# Altium footprint library Dlib.PcbLib: 70 footprints (part 2 of 5)
Each footprint in its own frame and in the unit in brackets; x right, y up, seen from the top. Pads: shape width x height; smd on the part's side, far side on the other; paste and mask are expansions set on the pad; w line width, h text height; cw(c..) or ccw(c..) is an arc to the next point about the centre after c.
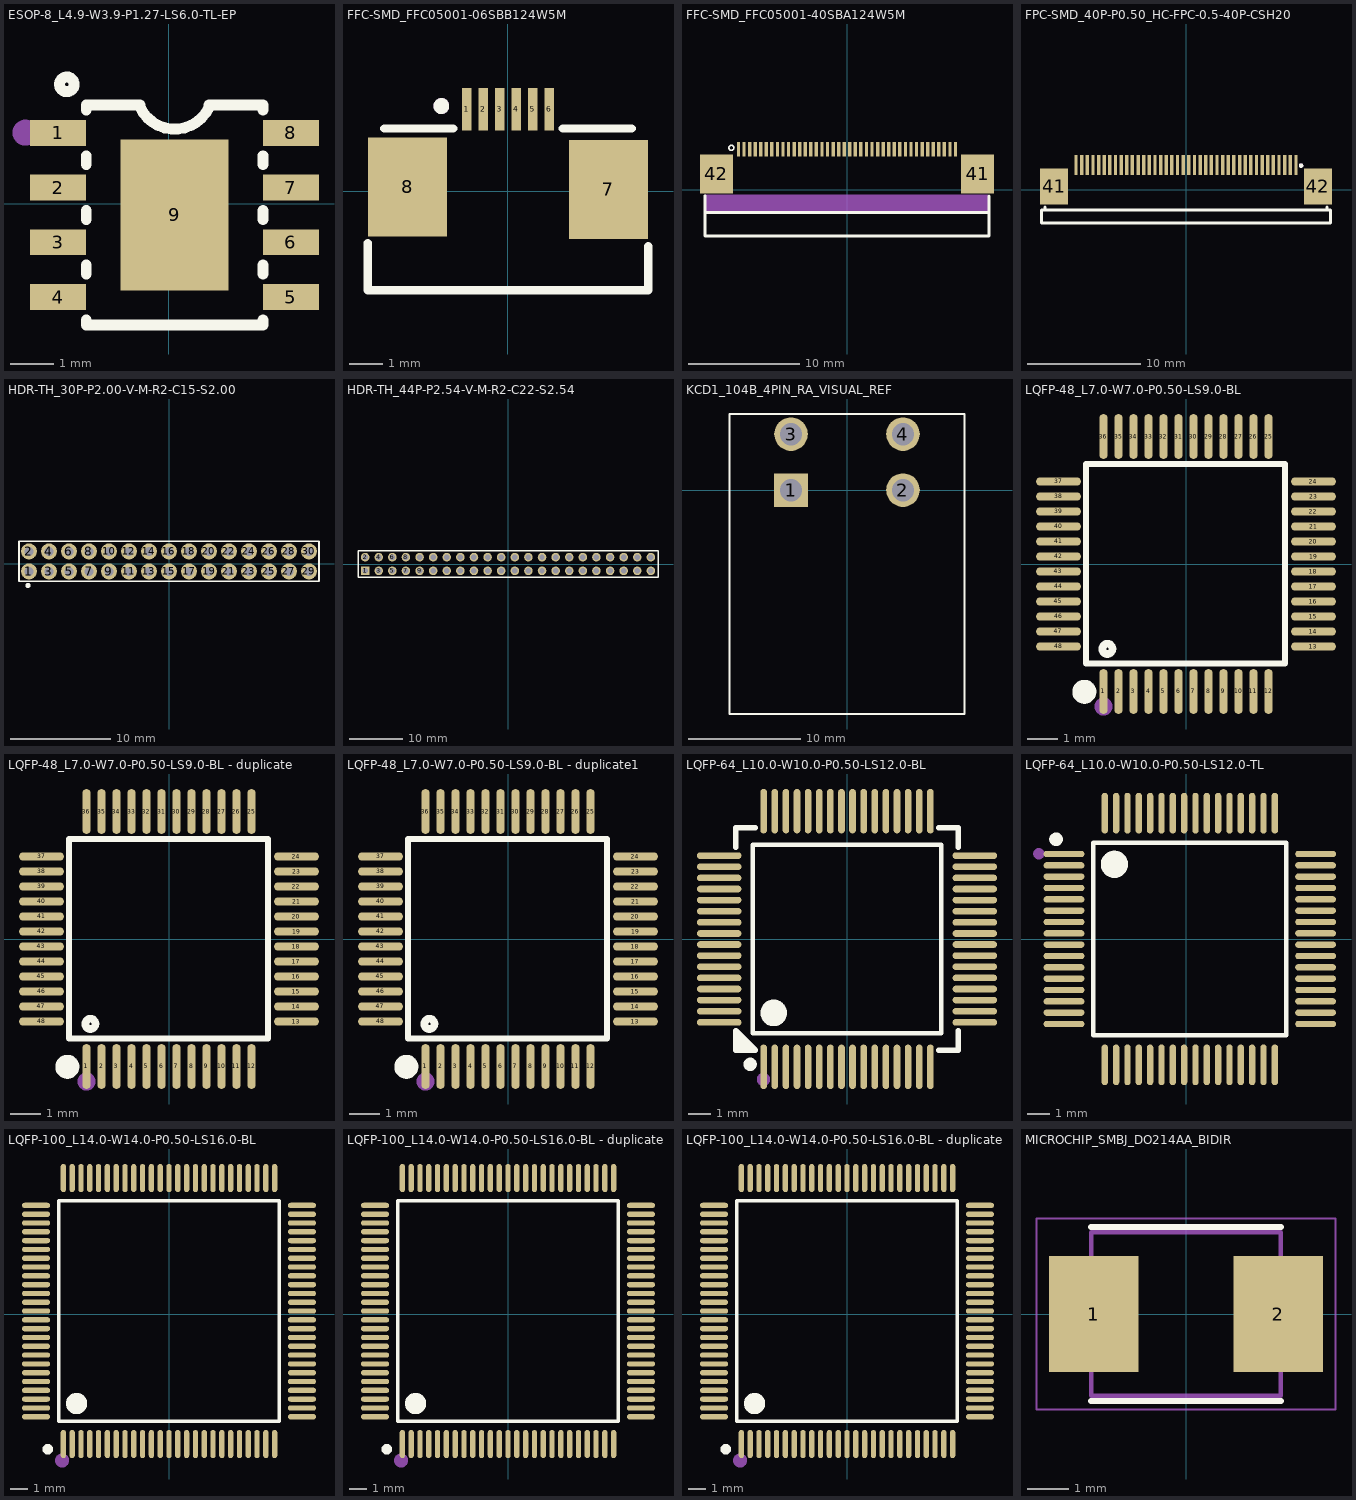
[diagram p1: the footprints below, top view; thin cyan lines are the x and y axes]

## ESOP-8_L4.9-W3.9-P1.27-LS6.0-TL-EP [mm]
pads (9):
  rect 1.3x0.6 smd paste+0 mask+0.051: 1(-2.57,1.643) 2(-2.57,0.373) 3(-2.57,-0.897) 4(-2.57,-2.167) 5(2.83,-2.167) 6(2.83,-0.897) 7(2.83,0.373) 8(2.83,1.643)
  rect 2.5x3.5 smd paste+0 mask+0.051: 9(0.13,-0.262)
Top Overlay:
  circle w0.254: c-2.37,2.768 r0.17
  lines w0.254: -1.92,-2.698 -1.92,-2.811 2.18,-2.811 2.18,-2.698 ; -1.92,-1.636 -1.92,-1.428 ; -1.92,-0.366 -1.92,-0.158 ; -1.92,0.904 -1.92,1.112 ; -1.92,2.174 -1.92,2.288 -0.67,2.288 ; -0.67,2.238 ccw(c0.13,2.614) 0.93,2.238 ; 0.93,2.288 2.18,2.288 2.18,2.174 ; 2.18,-1.636 2.18,-1.428 ; 2.18,-0.366 2.18,-0.158 ; 2.18,0.904 2.18,1.112
Mechanical 15:
  circle w0.3: c-3.33,1.648 r0.15

## FFC-SMD_FFC05001-06SBB124W5M [mm]
pads (8):
  rect 0.3x1.3 smd paste+0 mask+0.051: 1(-1.25,2.48) 2(-0.75,2.48) 3(-0.25,2.48) 4(0.25,2.48) 5(0.75,2.48) 6(1.25,2.48)
  rect 2.4x3 smd paste+0 mask+0.051: 7(3.045,0.055) 8(-3.045,0.13)
Top Overlay:
  circle w0.24: c-2.02,2.577 r0.12
  lines w0.254: -4.25,-1.573 -4.25,-3.003 4.25,-3.003 4.25,-1.673 ; -3.75,1.897 -1.656,1.897 ; 1.656,1.897 3.75,1.897
Mechanical 15:
  circle w0.24: c-2.02,2.577 r0.12
3D body "C2834005_FFC05001-06SBB124W5M.step": height 2, standoff 0, extent -4.25,-2.875 4.25,2.875

## FFC-SMD_FFC05001-40SBA124W5M [mm]
pads (42):
  rect 0.3x1.3 smd paste+0 mask+0.051: 1(-9.75,3.626) 2(-9.25,3.626) 3(-8.75,3.626) 4(-8.25,3.626) 5(-7.75,3.626) 6(-7.25,3.626) 7(-6.75,3.626) 8(-6.25,3.626) 9(-5.75,3.626) 10(-5.25,3.626) 11(-4.75,3.626) 12(-4.25,3.626) 13(-3.75,3.626) 14(-3.25,3.626) 15(-2.75,3.626) 16(-2.25,3.626) 17(-1.75,3.626) 18(-1.25,3.626) 19(-0.75,3.626) 20(-0.25,3.626) 21(0.25,3.626) 22(0.75,3.626) 23(1.25,3.626) 24(1.75,3.626) 25(2.25,3.626) 26(2.75,3.626) 27(3.25,3.626) 28(3.75,3.626) 29(4.25,3.626) 30(4.75,3.626) 31(5.25,3.626) 32(5.75,3.626) 33(6.25,3.626) 34(6.75,3.626) 35(7.25,3.626) 36(7.75,3.626) 37(8.25,3.626) 38(8.75,3.626) 39(9.25,3.626) 40(9.75,3.626)
  rect 3x3.5 smd paste+0 mask+0.051: 41(11.725,1.426) 42(-11.725,1.426)
Top Overlay:
  circle w0.15: c-10.385,3.762 r0.226
  lines w0.254: -12.757,-0.536 -12.75,-2.049 ; 12.747,-0.557 12.75,-2.049 ; -12.75,-2.049 -12.75,-4.149 12.75,-4.149 12.75,-2.049 ; -12.75,-2.049 12.75,-2.049
Mechanical 15:
  region: -12.7,-0.424 -12.7,-1.974 12.65,-1.974 12.65,-0.474
3D body "C2833959_FFC05001-40SBA124W5M.step": height 2.01, standoff 0, extent -12.75,-1.625 12.75,4.125

## FPC-SMD_40P-P0.50_HC-FPC-0.5-40P-CSH20 [mm]
pads (42):
  rect 0.3x1.8 smd paste+0 mask+0.05: 1(9.75,2.189) 2(9.25,2.189) 3(8.75,2.189) 4(8.25,2.189) 5(7.75,2.189) 6(7.25,2.189) 7(6.75,2.189) 8(6.25,2.189) 9(5.75,2.189) 10(5.25,2.189) 11(4.75,2.189) 12(4.25,2.189) 13(3.75,2.189) 14(3.25,2.189) 15(2.75,2.189) 16(2.25,2.189) 17(1.75,2.189) 18(1.25,2.189) 19(0.75,2.189) 20(0.25,2.189) 21(-0.25,2.189) 22(-0.75,2.189) 23(-1.25,2.189) 24(-1.75,2.189) 25(-2.25,2.189) 26(-2.75,2.189) 27(-3.25,2.189) 28(-3.75,2.189) 29(-4.25,2.189) 30(-4.75,2.189) 31(-5.25,2.189) 32(-5.75,2.189) 33(-6.25,2.189) 34(-6.75,2.189) 35(-7.25,2.189) 36(-7.75,2.189) 37(-8.25,2.189) 38(-8.75,2.189) 39(-9.25,2.189) 40(-9.75,2.189)
  rect 2.5x3.2 smd paste+0 mask+0.05: 41(-11.7,0.288) 42(11.7,0.288)
Top Overlay:
  circle w0.2: c10.2,2.138 r0.1
  lines w0.254: -12.5,-1.543 -12.5,-1.812 ; 12.5,-1.543 12.5,-1.812 ; -12.5,-1.812 -12.8,-1.812 -12.8,-2.962 12.8,-2.962 12.8,-1.812 12.5,-1.812 ; -12.5,-1.812 12.5,-1.812
Mechanical 15:
  circle w0.2: c10.2,2.138 r0.1
3D body "C2833959_FFC05001-40SBA124W5M.step": height 2.01, standoff 0, extent -12.75,-3.062 12.75,2.688

## HDR-TH_30P-P2.00-V-M-R2-C15-S2.00 [mm]
pads (30):
  round 1.6 hole 0.9 paste-2539.97 mask+0.051: 1(-14,-0.774) 2(-14,1.226) 3(-12,-0.774) 4(-12,1.226) 5(-10,-0.774) 6(-10,1.226) 7(-8,-0.774) 8(-8,1.226) 9(-6,-0.774) 10(-6,1.226) 11(-4,-0.774) 12(-4,1.226) 13(-2,-0.774) 14(-2,1.226) 15(0,-0.774) 16(0,1.226) 17(2,-0.774) 18(2,1.226) 19(4,-0.774) 20(4,1.226) 21(6,-0.774) 22(6,1.226) 23(8,-0.774) 24(8,1.226) 25(10,-0.774) 26(10,1.226) 27(12,-0.774) 28(12,1.226) 29(14,-0.774) 30(14,1.226)
Top Overlay:
  circle w0.254: c-14.1,-2.175 r0.127
  lines w0.152: -15,-1.774 -15,2.226 15,2.226 15,-1.774 -15,-1.774

## HDR-TH_44P-P2.54-V-M-R2-C22-S2.54 [mm]
pads (44):
  rect 1.6x1.6 hole 1.02 paste-2539.97 mask+0.05: 1(-26.67,-1.27)
  round 1.6 hole 1.02 paste-2539.97 mask+0.05: 2(-26.67,1.27) 3(-24.13,-1.27) 4(-24.13,1.27) 5(-21.59,-1.27) 6(-21.59,1.27) 7(-19.05,-1.27) 8(-19.05,1.27) 9(-16.51,-1.27) 10(-16.51,1.27) 11(-13.97,-1.27) 12(-13.97,1.27) 13(-11.43,-1.27) 14(-11.43,1.27) 15(-8.89,-1.27) 16(-8.89,1.27) 17(-6.35,-1.27) 18(-6.35,1.27) 19(-3.81,-1.27) 20(-3.81,1.27) 21(-1.27,-1.27) 22(-1.27,1.27) 23(1.27,-1.27) 24(1.27,1.27) 25(3.81,-1.27) 26(3.81,1.27) 27(6.35,-1.27) 28(6.35,1.27) 29(8.89,-1.27) 30(8.89,1.27) 31(11.43,-1.27) 32(11.43,1.27) 33(13.97,-1.27) 34(13.97,1.27) 35(16.51,-1.27) 36(16.51,1.27) 37(19.05,-1.27) 38(19.05,1.27) 39(21.59,-1.27) 40(21.59,1.27) 41(24.13,-1.27) 42(24.13,1.27) 43(26.67,-1.27) 44(26.67,1.27)
Top Overlay:
  lines w0.254: -28,-2.5 -28,2.5 28,2.5 28,-2.5 -28,-2.5

## KCD1_104B_4PIN_RA_VISUAL_REF [mm]
pads (4):
  rect 3x3 hole 2 paste-2539.97 mask+0.05: 1(-5,0)
  round 3 hole 2 paste-2539.97 mask+0.05: 2(5,0) 3(-5,5) 4(5,5)
Top Overlay:
  lines w0.15: -10.5,-20 -10.5,6.8 10.5,6.8 10.5,-20 -10.5,-20
3D body "KCD1-104B-similar.step": height 15, standoff -3.5, extent -10.5,-22.69 10.5,5.4

## LQFP-48_L7.0-W7.0-P0.50-LS9.0-BL [mm]
pads (48):
  oval 0.27x1.5 smd paste+0 mask+0.05: 1(-2.75,-4.25) 2(-2.25,-4.25) 3(-1.75,-4.25) 4(-1.25,-4.25) 5(-0.75,-4.25) 6(-0.25,-4.25) 7(0.25,-4.25) 8(0.75,-4.25) 9(1.25,-4.25) 10(1.75,-4.25) 11(2.25,-4.25) 12(2.75,-4.25) 25(2.75,4.25) 26(2.25,4.25) 27(1.75,4.25) 28(1.25,4.25) 29(0.75,4.25) 30(0.25,4.25) 31(-0.25,4.25) 32(-0.75,4.25) 33(-1.25,4.25) 34(-1.75,4.25) 35(-2.25,4.25) 36(-2.75,4.25)
  oval 1.5x0.27 smd paste+0 mask+0.05: 13(4.25,-2.75) 14(4.25,-2.25) 15(4.25,-1.75) 16(4.25,-1.25) 17(4.25,-0.75) 18(4.25,-0.25) 19(4.25,0.25) 20(4.25,0.75) 21(4.25,1.25) 22(4.25,1.75) 23(4.25,2.25) 24(4.25,2.75) 37(-4.25,2.75) 38(-4.25,2.25) 39(-4.25,1.75) 40(-4.25,1.25) 41(-4.25,0.75) 42(-4.25,0.25) 43(-4.25,-0.25) 44(-4.25,-0.75) 45(-4.25,-1.25) 46(-4.25,-1.75) 47(-4.25,-2.25) 48(-4.25,-2.75)
Top Overlay:
  circle w0.254: c-2.62,-2.83 r0.17
  lines w0.2: -2.896,3.34 3.302,3.34 3.302,-3.315 -3.327,-3.315 -3.327,3.34 -2.565,3.34
  lines w0.4: -3.39,-4.06 ccw(c-3.389,-4.26) -3.387,-4.06
Mechanical 15:
  circle w0.3: c-2.75,-4.75 r0.15
3D body "STM32F103C8T6--3DModel-STEP-510211.STEP": height 1.6, standoff 0, extent -4.5,-4.5 4.5,4.5

## LQFP-48_L7.0-W7.0-P0.50-LS9.0-BL - duplicate [mm]
pads (48):
  oval 0.27x1.5 smd paste+0 mask+0.05: 1(-2.75,-4.25) 2(-2.25,-4.25) 3(-1.75,-4.25) 4(-1.25,-4.25) 5(-0.75,-4.25) 6(-0.25,-4.25) 7(0.25,-4.25) 8(0.75,-4.25) 9(1.25,-4.25) 10(1.75,-4.25) 11(2.25,-4.25) 12(2.75,-4.25) 25(2.75,4.25) 26(2.25,4.25) 27(1.75,4.25) 28(1.25,4.25) 29(0.75,4.25) 30(0.25,4.25) 31(-0.25,4.25) 32(-0.75,4.25) 33(-1.25,4.25) 34(-1.75,4.25) 35(-2.25,4.25) 36(-2.75,4.25)
  oval 1.5x0.27 smd paste+0 mask+0.05: 13(4.25,-2.75) 14(4.25,-2.25) 15(4.25,-1.75) 16(4.25,-1.25) 17(4.25,-0.75) 18(4.25,-0.25) 19(4.25,0.25) 20(4.25,0.75) 21(4.25,1.25) 22(4.25,1.75) 23(4.25,2.25) 24(4.25,2.75) 37(-4.25,2.75) 38(-4.25,2.25) 39(-4.25,1.75) 40(-4.25,1.25) 41(-4.25,0.75) 42(-4.25,0.25) 43(-4.25,-0.25) 44(-4.25,-0.75) 45(-4.25,-1.25) 46(-4.25,-1.75) 47(-4.25,-2.25) 48(-4.25,-2.75)
Top Overlay:
  circle w0.254: c-2.62,-2.83 r0.17
  lines w0.2: -2.896,3.34 3.302,3.34 3.302,-3.315 -3.327,-3.315 -3.327,3.34 -2.565,3.34
  lines w0.4: -3.39,-4.06 ccw(c-3.389,-4.26) -3.387,-4.06
Mechanical 15:
  circle w0.3: c-2.75,-4.75 r0.15

## LQFP-48_L7.0-W7.0-P0.50-LS9.0-BL - duplicate1 [mm]
pads (48):
  oval 0.27x1.5 smd paste+0 mask+0.05: 1(-2.75,-4.25) 2(-2.25,-4.25) 3(-1.75,-4.25) 4(-1.25,-4.25) 5(-0.75,-4.25) 6(-0.25,-4.25) 7(0.25,-4.25) 8(0.75,-4.25) 9(1.25,-4.25) 10(1.75,-4.25) 11(2.25,-4.25) 12(2.75,-4.25) 25(2.75,4.25) 26(2.25,4.25) 27(1.75,4.25) 28(1.25,4.25) 29(0.75,4.25) 30(0.25,4.25) 31(-0.25,4.25) 32(-0.75,4.25) 33(-1.25,4.25) 34(-1.75,4.25) 35(-2.25,4.25) 36(-2.75,4.25)
  oval 1.5x0.27 smd paste+0 mask+0.05: 13(4.25,-2.75) 14(4.25,-2.25) 15(4.25,-1.75) 16(4.25,-1.25) 17(4.25,-0.75) 18(4.25,-0.25) 19(4.25,0.25) 20(4.25,0.75) 21(4.25,1.25) 22(4.25,1.75) 23(4.25,2.25) 24(4.25,2.75) 37(-4.25,2.75) 38(-4.25,2.25) 39(-4.25,1.75) 40(-4.25,1.25) 41(-4.25,0.75) 42(-4.25,0.25) 43(-4.25,-0.25) 44(-4.25,-0.75) 45(-4.25,-1.25) 46(-4.25,-1.75) 47(-4.25,-2.25) 48(-4.25,-2.75)
Top Overlay:
  circle w0.254: c-2.62,-2.83 r0.17
  lines w0.2: -2.896,3.34 3.302,3.34 3.302,-3.315 -3.327,-3.315 -3.327,3.34 -2.565,3.34
  lines w0.4: -3.39,-4.06 ccw(c-3.389,-4.26) -3.387,-4.06
Mechanical 15:
  circle w0.3: c-2.75,-4.75 r0.15

## LQFP-64_L10.0-W10.0-P0.50-LS12.0-BL [mm]
pads (64):
  oval 0.3x2 smd paste+0 mask+0.051: 1(-3.75,-5.75) 2(-3.25,-5.75) 3(-2.75,-5.75) 4(-2.25,-5.75) 5(-1.75,-5.75) 6(-1.25,-5.75) 7(-0.75,-5.75) 8(-0.25,-5.75) 9(0.25,-5.75) 10(0.75,-5.75) 11(1.25,-5.75) 12(1.75,-5.75) 13(2.25,-5.75) 14(2.75,-5.75) 15(3.25,-5.75) 16(3.75,-5.75) 33(3.75,5.75) 34(3.25,5.75) 35(2.75,5.75) 36(2.25,5.75) 37(1.75,5.75) 38(1.25,5.75) 39(0.75,5.75) 40(0.25,5.75) 41(-0.25,5.75) 42(-0.75,5.75) 43(-1.25,5.75) 44(-1.75,5.75) 45(-2.25,5.75) 46(-2.75,5.75) 47(-3.25,5.75) 48(-3.75,5.75)
  oval 2x0.3 smd paste+0 mask+0.051: 17(5.75,-3.75) 18(5.75,-3.25) 19(5.75,-2.75) 20(5.75,-2.25) 21(5.75,-1.75) 22(5.75,-1.25) 23(5.75,-0.75) 24(5.75,-0.25) 25(5.75,0.25) 26(5.75,0.75) 27(5.75,1.25) 28(5.75,1.75) 29(5.75,2.25) 30(5.75,2.75) 31(5.75,3.25) 32(5.75,3.75) 49(-5.75,3.75) 50(-5.75,3.25) 51(-5.75,2.75) 52(-5.75,2.25) 53(-5.75,1.75) 54(-5.75,1.25) 55(-5.75,0.75) 56(-5.75,0.25) 57(-5.75,-0.25) 58(-5.75,-0.75) 59(-5.75,-1.25) 60(-5.75,-1.75) 61(-5.75,-2.25) 62(-5.75,-2.75) 63(-5.75,-3.25) 64(-5.75,-3.75)
Top Overlay:
  region: -4.131,-5 -5,-4.131 -5,-5
  lines w0.2: -4.25,-4.25 4.25,-4.25 4.25,4.25 -4.25,4.25 -4.25,-4.25
  lines w0.254: -5,4.131 -5,5 -4.131,5 ; 4.131,-5 5,-5 5,-4.131 ; 4.131,5 5,5 5,4.131 ; -5,-4.131 -5,-5 -4.131,-5 -5,-4.131 ; -5,-4.131 -5,-4.131
  lines w0.3: -4.361,-5.49 ccw(c-4.36,-5.64) -4.359,-5.49
  lines w0.6: -3.299,-3.025 ccw(c-3.297,-3.325) -3.294,-3.025
Mechanical 15:
  circle w0.3: c-3.76,-6.32 r0.15
3D body "STM32F405RGT6.STEP": height 1.6, standoff 0, extent -6,-6 6,6

## LQFP-64_L10.0-W10.0-P0.50-LS12.0-TL [mm]
pads (64):
  oval 1.8x0.28 smd paste+0 mask+0.05: 1(-5.382,3.75) 2(-5.382,3.25) 3(-5.382,2.75) 4(-5.382,2.25) 5(-5.382,1.75) 6(-5.382,1.25) 7(-5.382,0.75) 8(-5.382,0.25) 9(-5.382,-0.25) 10(-5.382,-0.75) 11(-5.382,-1.25) 12(-5.382,-1.75) 13(-5.382,-2.25) 14(-5.382,-2.75) 15(-5.382,-3.25) 16(-5.382,-3.75) 33(5.717,-3.75) 34(5.717,-3.25) 35(5.717,-2.75) 36(5.717,-2.25) 37(5.717,-1.75) 38(5.717,-1.25) 39(5.717,-0.75) 40(5.717,-0.25) 41(5.717,0.25) 42(5.717,0.75) 43(5.717,1.25) 44(5.717,1.75) 45(5.717,2.25) 46(5.717,2.75) 47(5.717,3.25) 48(5.717,3.75)
  oval 0.28x1.8 smd paste+0 mask+0.05: 17(-3.583,-5.55) 18(-3.082,-5.55) 19(-2.583,-5.55) 20(-2.082,-5.55) 21(-1.583,-5.55) 22(-1.082,-5.55) 23(-0.583,-5.55) 24(-0.082,-5.55) 25(0.417,-5.55) 26(0.918,-5.55) 27(1.417,-5.55) 28(1.918,-5.55) 29(2.417,-5.55) 30(2.918,-5.55) 31(3.417,-5.55) 32(3.918,-5.55) 49(3.918,5.55) 50(3.417,5.55) 51(2.918,5.55) 52(2.417,5.55) 53(1.918,5.55) 54(1.417,5.55) 55(0.918,5.55) 56(0.417,5.55) 57(-0.082,5.55) 58(-0.583,5.55) 59(-1.082,5.55) 60(-1.583,5.55) 61(-2.082,5.55) 62(-2.583,5.55) 63(-3.082,5.55) 64(-3.583,5.55)
Top Overlay:
  lines w0.2: -4.083,-4.25 4.417,-4.25 4.417,4.25 -4.083,4.25 -4.083,-4.25
  lines w0.3: -5.583,4.397 cw(c-5.733,4.398) -5.583,4.399
  lines w0.6: -2.858,3.294 cw(c-3.158,3.297) -2.858,3.299
Mechanical 15:
  circle w0.25: c-6.492,3.76 r0.125
3D body "STM32H562RGT6.STEP": height 1.6, standoff 0, extent -5.797,-6 6.203,6

## LQFP-100_L14.0-W14.0-P0.50-LS16.0-BL [mm]
pads (100):
  oval 0.3x1.6 smd paste-100 mask+0.051: 1(-6,-7.383) 2(-5.5,-7.383) 3(-5,-7.383) 4(-4.5,-7.383) 5(-4,-7.383) 6(-3.5,-7.383) 7(-3,-7.383) 8(-2.5,-7.383) 9(-2,-7.383) 10(-1.5,-7.383) 11(-1,-7.383) 12(-0.5,-7.383) 13(0,-7.383) 14(0.5,-7.383) 15(1,-7.383) 16(1.5,-7.383) 17(2,-7.383) 18(2.5,-7.383) 19(3,-7.383) 20(3.5,-7.383) 21(4,-7.383) 22(4.5,-7.383) 23(5,-7.383) 24(5.5,-7.383) 25(6,-7.383) 51(6,7.717) 52(5.5,7.717) 53(5,7.717) 54(4.5,7.717) 55(4,7.717) 56(3.5,7.717) 57(3,7.717) 58(2.5,7.717) 59(2,7.717) 60(1.5,7.717) 61(1,7.717) 62(0.5,7.717) 63(0,7.717) 64(-0.5,7.717) 65(-1,7.717) 66(-1.5,7.717) 67(-2,7.717) 68(-2.5,7.717) 69(-3,7.717) 70(-3.5,7.717) 71(-4,7.717) 72(-4.5,7.717) 73(-5,7.717) 74(-5.5,7.717) 75(-6,7.717)
  oval 1.6x0.3 smd paste-100 mask+0.051: 26(7.55,-5.833) 27(7.55,-5.333) 28(7.55,-4.833) 29(7.55,-4.333) 30(7.55,-3.833) 31(7.55,-3.333) 32(7.55,-2.833) 33(7.55,-2.333) 34(7.55,-1.833) 35(7.55,-1.333) 36(7.55,-0.833) 37(7.55,-0.333) 38(7.55,0.167) 39(7.55,0.667) 40(7.55,1.167) 41(7.55,1.667) 42(7.55,2.167) 43(7.55,2.667) 44(7.55,3.167) 45(7.55,3.667) 46(7.55,4.167) 47(7.55,4.667) 48(7.55,5.167) 49(7.55,5.667) 50(7.55,6.167) 76(-7.55,6.167) 77(-7.55,5.667) 78(-7.55,5.167) 79(-7.55,4.667) 80(-7.55,4.167) 81(-7.55,3.667) 82(-7.55,3.167) 83(-7.55,2.667) 84(-7.55,2.167) 85(-7.55,1.667) 86(-7.55,1.167) 87(-7.55,0.667) 88(-7.55,0.167) 89(-7.55,-0.333) 90(-7.55,-0.833) 91(-7.55,-1.333) 92(-7.55,-1.833) 93(-7.55,-2.333) 94(-7.55,-2.833) 95(-7.55,-3.333) 96(-7.55,-3.833) 97(-7.55,-4.333) 98(-7.55,-4.833) 99(-7.55,-5.333) 100(-7.55,-5.833)
Top Overlay:
  lines w0.2: -6.25,-6.083 6.25,-6.083 6.25,6.417 -6.25,6.417 -6.25,-6.083
  lines w0.3: -6.883,-7.529 ccw(c-6.882,-7.679) -6.881,-7.529
  lines w0.6: -5.25,-4.784 ccw(c-5.248,-5.084) -5.245,-4.784
Top Paste:
  drawing of 100 lines, arcs and shapes, not listed
Mechanical 15:
  circle w0.4: c-6.071,-8.317 r0.2
3D body "STM32F407VET6.STEP": height 1.6, standoff 0, extent -8,-7.83 8,8.17

## LQFP-100_L14.0-W14.0-P0.50-LS16.0-BL - duplicate [mm]
pads (100):
  oval 0.3x1.6 smd paste+0 mask+0.051: 1(-6,-7.383) 2(-5.5,-7.383) 3(-5,-7.383) 4(-4.5,-7.383) 5(-4,-7.383) 6(-3.5,-7.383) 7(-3,-7.383) 8(-2.5,-7.383) 9(-2,-7.383) 10(-1.5,-7.383) 11(-1,-7.383) 12(-0.5,-7.383) 13(0,-7.383) 14(0.5,-7.383) 15(1,-7.383) 16(1.5,-7.383) 17(2,-7.383) 18(2.5,-7.383) 19(3,-7.383) 20(3.5,-7.383) 21(4,-7.383) 22(4.5,-7.383) 23(5,-7.383) 24(5.5,-7.383) 25(6,-7.383) 51(6,7.717) 52(5.5,7.717) 53(5,7.717) 54(4.5,7.717) 55(4,7.717) 56(3.5,7.717) 57(3,7.717) 58(2.5,7.717) 59(2,7.717) 60(1.5,7.717) 61(1,7.717) 62(0.5,7.717) 63(0,7.717) 64(-0.5,7.717) 65(-1,7.717) 66(-1.5,7.717) 67(-2,7.717) 68(-2.5,7.717) 69(-3,7.717) 70(-3.5,7.717) 71(-4,7.717) 72(-4.5,7.717) 73(-5,7.717) 74(-5.5,7.717) 75(-6,7.717)
  oval 1.6x0.3 smd paste+0 mask+0.051: 26(7.55,-5.833) 27(7.55,-5.333) 28(7.55,-4.833) 29(7.55,-4.333) 30(7.55,-3.833) 31(7.55,-3.333) 32(7.55,-2.833) 33(7.55,-2.333) 34(7.55,-1.833) 35(7.55,-1.333) 36(7.55,-0.833) 37(7.55,-0.333) 38(7.55,0.167) 39(7.55,0.667) 40(7.55,1.167) 41(7.55,1.667) 42(7.55,2.167) 43(7.55,2.667) 44(7.55,3.167) 45(7.55,3.667) 46(7.55,4.167) 47(7.55,4.667) 48(7.55,5.167) 49(7.55,5.667) 50(7.55,6.167) 76(-7.55,6.167) 77(-7.55,5.667) 78(-7.55,5.167) 79(-7.55,4.667) 80(-7.55,4.167) 81(-7.55,3.667) 82(-7.55,3.167) 83(-7.55,2.667) 84(-7.55,2.167) 85(-7.55,1.667) 86(-7.55,1.167) 87(-7.55,0.667) 88(-7.55,0.167) 89(-7.55,-0.333) 90(-7.55,-0.833) 91(-7.55,-1.333) 92(-7.55,-1.833) 93(-7.55,-2.333) 94(-7.55,-2.833) 95(-7.55,-3.333) 96(-7.55,-3.833) 97(-7.55,-4.333) 98(-7.55,-4.833) 99(-7.55,-5.333) 100(-7.55,-5.833)
Top Overlay:
  lines w0.2: -6.25,-6.083 -6.25,6.417 6.25,6.417 6.25,-6.083 -6.25,-6.083
  lines w0.3: -6.883,-7.529 ccw(c-6.882,-7.679) -6.881,-7.529
  lines w0.6: -5.25,-4.784 ccw(c-5.248,-5.084) -5.245,-4.784
Mechanical 15:
  circle w0.4: c-6.071,-8.317 r0.2

## LQFP-100_L14.0-W14.0-P0.50-LS16.0-BL - duplicate1 [mm]
pads (100):
  oval 0.3x1.6 smd paste+0 mask+0.051: 1(-6,-7.383) 2(-5.5,-7.383) 3(-5,-7.383) 4(-4.5,-7.383) 5(-4,-7.383) 6(-3.5,-7.383) 7(-3,-7.383) 8(-2.5,-7.383) 9(-2,-7.383) 10(-1.5,-7.383) 11(-1,-7.383) 12(-0.5,-7.383) 13(0,-7.383) 14(0.5,-7.383) 15(1,-7.383) 16(1.5,-7.383) 17(2,-7.383) 18(2.5,-7.383) 19(3,-7.383) 20(3.5,-7.383) 21(4,-7.383) 22(4.5,-7.383) 23(5,-7.383) 24(5.5,-7.383) 25(6,-7.383) 51(6,7.717) 52(5.5,7.717) 53(5,7.717) 54(4.5,7.717) 55(4,7.717) 56(3.5,7.717) 57(3,7.717) 58(2.5,7.717) 59(2,7.717) 60(1.5,7.717) 61(1,7.717) 62(0.5,7.717) 63(0,7.717) 64(-0.5,7.717) 65(-1,7.717) 66(-1.5,7.717) 67(-2,7.717) 68(-2.5,7.717) 69(-3,7.717) 70(-3.5,7.717) 71(-4,7.717) 72(-4.5,7.717) 73(-5,7.717) 74(-5.5,7.717) 75(-6,7.717)
  oval 1.6x0.3 smd paste+0 mask+0.051: 26(7.55,-5.833) 27(7.55,-5.333) 28(7.55,-4.833) 29(7.55,-4.333) 30(7.55,-3.833) 31(7.55,-3.333) 32(7.55,-2.833) 33(7.55,-2.333) 34(7.55,-1.833) 35(7.55,-1.333) 36(7.55,-0.833) 37(7.55,-0.333) 38(7.55,0.167) 39(7.55,0.667) 40(7.55,1.167) 41(7.55,1.667) 42(7.55,2.167) 43(7.55,2.667) 44(7.55,3.167) 45(7.55,3.667) 46(7.55,4.167) 47(7.55,4.667) 48(7.55,5.167) 49(7.55,5.667) 50(7.55,6.167) 76(-7.55,6.167) 77(-7.55,5.667) 78(-7.55,5.167) 79(-7.55,4.667) 80(-7.55,4.167) 81(-7.55,3.667) 82(-7.55,3.167) 83(-7.55,2.667) 84(-7.55,2.167) 85(-7.55,1.667) 86(-7.55,1.167) 87(-7.55,0.667) 88(-7.55,0.167) 89(-7.55,-0.333) 90(-7.55,-0.833) 91(-7.55,-1.333) 92(-7.55,-1.833) 93(-7.55,-2.333) 94(-7.55,-2.833) 95(-7.55,-3.333) 96(-7.55,-3.833) 97(-7.55,-4.333) 98(-7.55,-4.833) 99(-7.55,-5.333) 100(-7.55,-5.833)
Top Overlay:
  lines w0.2: -6.25,-6.083 6.25,-6.083 6.25,6.417 -6.25,6.417 -6.25,-6.083
  lines w0.3: -6.883,-7.529 ccw(c-6.882,-7.679) -6.881,-7.529
  lines w0.6: -5.25,-4.784 ccw(c-5.248,-5.084) -5.245,-4.784
Mechanical 15:
  circle w0.4: c-6.071,-8.317 r0.2

## MICROCHIP_SMBJ_DO214AA_BIDIR [mm]
pads (2):
  rect 2.16x2.79 smd paste+0 mask+0.05: 1(-2.22,0) 2(2.22,0)
Top Overlay:
  lines w0.15: -2.285,-2.1 2.285,-2.1 ; -2.285,2.1 2.285,2.1
Mechanical 1:
  lines w0.1: -2.285,-1.97 2.285,-1.97 2.285,1.97 -2.285,1.97 -2.285,-1.97
Mechanical 15:
  lines w0.05: -3.6,-2.3 3.6,-2.3 3.6,2.3 -3.6,2.3 -3.6,-2.3